# Altium footprint library 2019-09-19_14-13-56.PcbLib: 3 footprints
Each footprint in its own frame and in the unit in brackets; x right, y up, seen from the top. Pads: shape width x height; smd on the part's side, far side on the other; paste and mask are expansions set on the pad; w line width, h text height; cw(c..) or ccw(c..) is an arc to the next point about the centre after c.
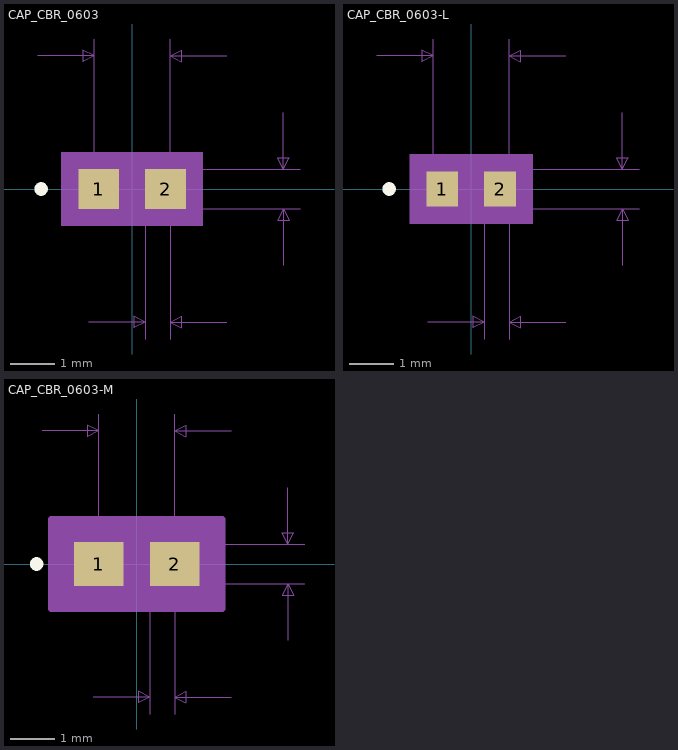
[diagram p0: the footprints below, top view; thin cyan lines are the x and y axes]

## CAP_CBR_0603 [mil]
pads (2):
  rect 36x35 smd paste+0 mask+0: 1(-29.5,0) 2(29.5,0)
Top Overlay:
  circle w6: c-80.5,0 r3
Mechanical 5:
  region: 62.5,-32.5 -62.5,-32.5 -62.5,32.5 62.5,32.5
Mechanical 7:
  lines w1: -83.5,117.5 -33.5,117.5 ; -38.5,-117.5 11.5,-117.5 ; -33.5,0 -33.5,132.5 ; 0,-17.5 148.5,-17.5 ; 0,17.5 148.5,17.5 ; 11.5,-132.5 11.5,0 ; 33.5,-132.5 33.5,0 33.5,132.5 ; 83.5,-117.5 33.5,-117.5 ; 83.5,117.5 33.5,117.5 ; 133.5,-67.5 133.5,-17.5 ; 133.5,67.5 133.5,17.5 ; -33.5,117.5 -43.5,122.5 -43.5,112.5 -33.5,117.5 ; 11.5,-117.5 1.5,-112.5 1.5,-122.5 11.5,-117.5 ; 33.5,-117.5 43.5,-112.5 43.5,-122.5 33.5,-117.5 ; 33.5,117.5 43.5,122.5 43.5,112.5 33.5,117.5 ; 133.5,-17.5 128.5,-27.5 138.5,-27.5 133.5,-17.5 ; 133.5,17.5 128.5,27.5 138.5,27.5 133.5,17.5
  text "Default Padstyle: RX36Y35D0T" at -350,-287.5 h50
  text "Alternate 1 Padstyle: OX60Y90D30P" at -412.5,-387.5 h50
  text "Alternate 2 Padstyle: OX90Y60D30P" at -412.5,-487.5 h50
  text "0.035in/0.889mm" at 153.5,-12.5 h25
  text "0.067in/1.702mm" at -93.75,137.5 h25
  text "0.022in/0.559mm" at -71.25,-162.5 h25
Mechanical 13:
  circle w0: c-24.5,0 r3
  lines w1: -33.5,-17.5 -33.5,17.5 ; -33.5,-17.5 -11.5,-17.5 -11.5,17.5 -33.5,17.5 ; -33.5,-17.5 33.5,-17.5 ; -33.5,-17.5 -33.5,17.5 ; -33.5,17.5 33.5,17.5 ; 33.5,-17.5 11.5,-17.5 11.5,17.5 33.5,17.5 ; 33.5,-17.5 33.5,17.5 ; 33.5,-17.5 33.5,17.5
Mechanical 15:
  region: 57.5,-27.5 -57.5,-27.5 -57.5,27.5 57.5,27.5
  lines w6: -57.5,-27.5 -57.5,27.5 57.5,27.5 57.5,-27.5 -57.5,-27.5
3D body: height 10, standoff 0, extent 0,0 10,10

## CAP_CBR_0603-L [mil]
pads (2):
  rect 28x31 smd paste+0 mask+0: 1(-25.5,0) 2(25.5,0)
Top Overlay:
  circle w6: c-72.5,0 r3
Mechanical 5:
  region: 54.5,-30.5 -54.5,-30.5 -54.5,30.5 54.5,30.5
Mechanical 7:
  lines w1: -83.5,117.5 -33.5,117.5 ; -38.5,-117.5 11.5,-117.5 ; -33.5,0 -33.5,132.5 ; 0,-17.5 148.5,-17.5 ; 0,17.5 148.5,17.5 ; 11.5,-132.5 11.5,0 ; 33.5,-132.5 33.5,0 33.5,132.5 ; 83.5,-117.5 33.5,-117.5 ; 83.5,117.5 33.5,117.5 ; 133.5,-67.5 133.5,-17.5 ; 133.5,67.5 133.5,17.5 ; -33.5,117.5 -43.5,122.5 -43.5,112.5 -33.5,117.5 ; 11.5,-117.5 1.5,-112.5 1.5,-122.5 11.5,-117.5 ; 33.5,-117.5 43.5,-112.5 43.5,-122.5 33.5,-117.5 ; 33.5,117.5 43.5,122.5 43.5,112.5 33.5,117.5 ; 133.5,-17.5 128.5,-27.5 138.5,-27.5 133.5,-17.5 ; 133.5,17.5 128.5,27.5 138.5,27.5 133.5,17.5
  text "Default Padstyle: RX28Y31D0T" at -350,-285.5 h50
  text "Alternate 1 Padstyle: OX60Y90D30P" at -412.5,-385.5 h50
  text "Alternate 2 Padstyle: OX90Y60D30P" at -412.5,-485.5 h50
  text "0.035in/0.889mm" at 153.5,-12.5 h25
  text "0.067in/1.702mm" at -93.75,137.5 h25
  text "0.022in/0.559mm" at -71.25,-162.5 h25
Mechanical 13:
  circle w0: c-20.5,0 r3
  lines w1: -33.5,-17.5 -33.5,17.5 ; -33.5,-17.5 -11.5,-17.5 -11.5,17.5 -33.5,17.5 ; -33.5,-17.5 33.5,-17.5 ; -33.5,-17.5 -33.5,17.5 ; -33.5,17.5 33.5,17.5 ; 33.5,-17.5 11.5,-17.5 11.5,17.5 33.5,17.5 ; 33.5,-17.5 33.5,17.5 ; 33.5,-17.5 33.5,17.5
Mechanical 15:
  region: 43.5,-19.5 -43.5,-19.5 -43.5,19.5 43.5,19.5
  lines w6: -43.5,-19.5 -43.5,19.5 43.5,19.5 43.5,-19.5 -43.5,-19.5
3D body: height 10, standoff 0, extent 0,0 10,10

## CAP_CBR_0603-M [mil]
pads (2):
  rect 44x39 smd paste+0 mask+0: 1(-33.5,0) 2(33.5,0)
Top Overlay:
  circle w6: c-88.5,0 r3
Mechanical 5:
  region: 70.5,-34.5 -70.5,-34.5 -70.5,34.5 70.5,34.5
Mechanical 7:
  lines w1: -83.5,117.5 -33.5,117.5 ; -38.5,-117.5 11.5,-117.5 ; -33.5,0 -33.5,132.5 ; 0,-17.5 148.5,-17.5 ; 0,17.5 148.5,17.5 ; 11.5,-132.5 11.5,0 ; 33.5,-132.5 33.5,0 33.5,132.5 ; 83.5,-117.5 33.5,-117.5 ; 83.5,117.5 33.5,117.5 ; 133.5,-67.5 133.5,-17.5 ; 133.5,67.5 133.5,17.5 ; -33.5,117.5 -43.5,122.5 -43.5,112.5 -33.5,117.5 ; 11.5,-117.5 1.5,-112.5 1.5,-122.5 11.5,-117.5 ; 33.5,-117.5 43.5,-112.5 43.5,-122.5 33.5,-117.5 ; 33.5,117.5 43.5,122.5 43.5,112.5 33.5,117.5 ; 133.5,-17.5 128.5,-27.5 138.5,-27.5 133.5,-17.5 ; 133.5,17.5 128.5,27.5 138.5,27.5 133.5,17.5
  text "Default Padstyle: RX44Y39D0T" at -350,-289.5 h50
  text "Alternate 1 Padstyle: OX60Y90D30P" at -412.5,-389.5 h50
  text "Alternate 2 Padstyle: OX90Y60D30P" at -412.5,-489.5 h50
  text "0.035in/0.889mm" at 153.5,-12.5 h25
  text "0.067in/1.702mm" at -93.75,137.5 h25
  text "0.022in/0.559mm" at -71.25,-162.5 h25
Mechanical 13:
  circle w0: c-28.5,0 r3
  lines w1: -33.5,-17.5 -33.5,17.5 ; -33.5,-17.5 -11.5,-17.5 -11.5,17.5 -33.5,17.5 ; -33.5,-17.5 33.5,-17.5 ; -33.5,-17.5 -33.5,17.5 ; -33.5,17.5 33.5,17.5 ; 33.5,-17.5 11.5,-17.5 11.5,17.5 33.5,17.5 ; 33.5,-17.5 33.5,17.5 ; 33.5,-17.5 33.5,17.5
Mechanical 15:
  region: 75.5,-39.5 -75.5,-39.5 -75.5,39.5 75.5,39.5
  lines w6: -75.5,-39.5 -75.5,39.5 75.5,39.5 75.5,-39.5 -75.5,-39.5
3D body: height 10, standoff 0, extent 0,0 10,10